# Altium footprint library ELO301_G1.PcbLib: 17 footprints (part 1 of 2)
Each footprint in its own frame and in the unit in brackets; x right, y up, seen from the top. Pads: shape width x height; smd on the part's side, far side on the other; paste and mask are expansions set on the pad; w line width, h text height; cw(c..) or ccw(c..) is an arc to the next point about the centre after c.
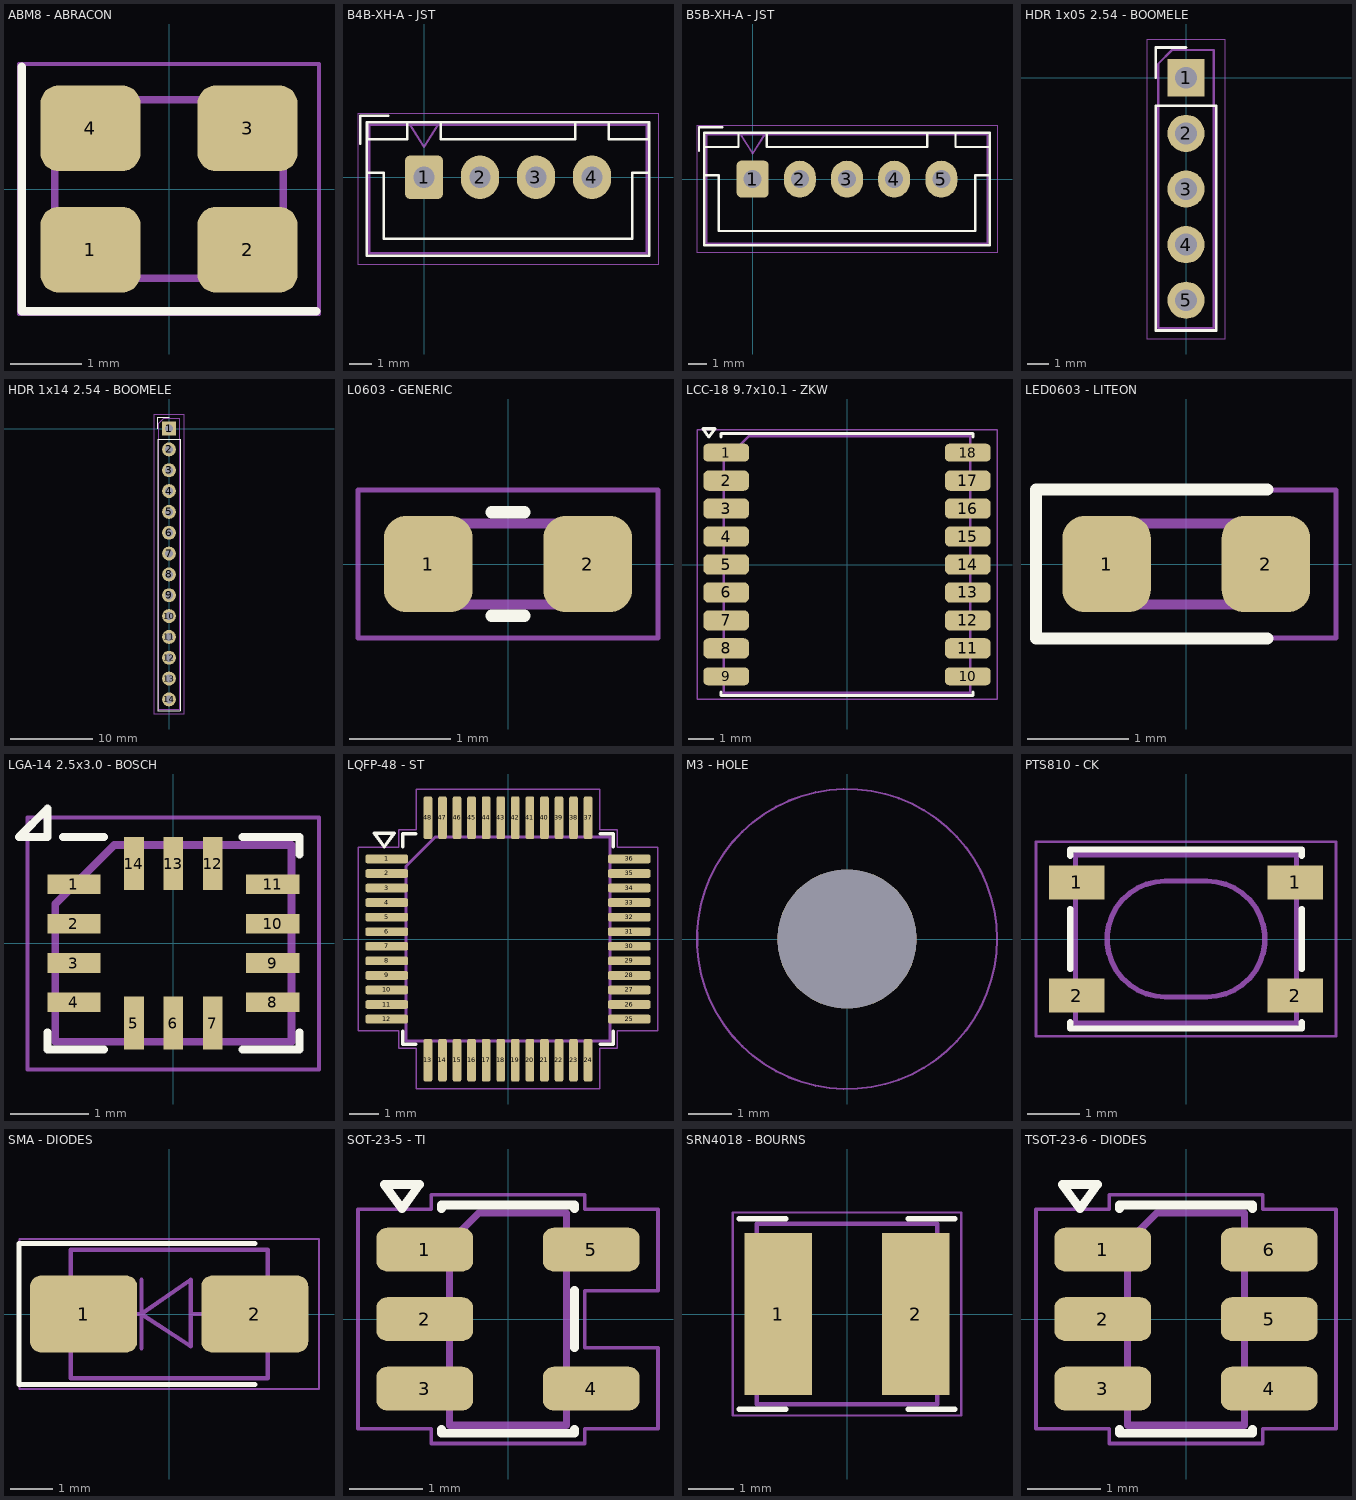
[diagram p0: the footprints below, top view; thin cyan lines are the x and y axes]

## ABM8 - ABRACON [mm] "Abracon ABM8G, Miniature Ceramic Crystal, 3.2x2.5mm package, SMD, http://www.abracon.com/Resonators/ABM8G.pdf"
pads (4):
  rrect42% 1.4x1.2 smd: 1(-1.1,-0.85) 2(1.1,-0.85) 3(1.1,0.85) 4(-1.1,0.85)
Top Overlay:
  lines w0.12: -2.06,1.71 -2.06,-1.71 2.06,-1.71
Mechanical 13:
  lines w0.1: -1.6,-0.625 -0.975,-1.25 1.6,-1.25 1.6,1.25 -1.6,1.25 -1.6,-0.625
Mechanical 15:
  lines w0.05: -2.1,-1.75 2.1,-1.75 2.1,1.75 -2.1,1.75 -2.1,-1.75
Mechanical 29:
  text ".Designator" at -0.508,-0.102 h0.25

## B4B-XH-A - JST [mm] "JST XH series connector, B4B-XH-A (http://www.jst-mfg.com/product/pdf/eng/eXH.pdf)"
pads (4):
  rrect29% 1.7x1.95 hole 0.95: 1(0,0)
  oval 1.7x1.95 hole 0.95: 2(2.5,0) 3(5,0) 4(7.5,0)
Top Overlay:
  lines w0.12: -2.85,1.5 -2.85,2.75 -1.6,2.75 ; -2.55,0.2 -1.8,0.2 -1.8,-2.75 3.75,-2.75 9.3,-2.75 9.3,0.2 10.05,0.2 ; -2.56,-3.51 10.06,-3.51 10.06,2.46 -2.56,2.46 -2.56,-3.51 ; -2.55,1.7 -0.75,1.7 -0.75,2.45 -2.55,2.45 -2.55,1.7 ; 0.75,1.7 6.75,1.7 6.75,2.45 0.75,2.45 0.75,1.7 ; 8.25,1.7 10.05,1.7 10.05,2.45 8.25,2.45 8.25,1.7
Mechanical 13:
  lines w0.1: -0.625,2.35 0,1.35 0.625,2.35 ; -2.45,-3.4 9.95,-3.4 9.95,2.35 -2.45,2.35 -2.45,-3.4
Mechanical 15:
  lines w0.05: -2.95,-3.9 10.45,-3.9 10.45,2.85 -2.95,2.85 -2.95,-3.9
Mechanical 29:
  text ".Designator" at -0.508,-0.102 h0.25

## B5B-XH-A - JST [mm] "JST XH series connector, B5B-XH-A (http://www.jst-mfg.com/product/pdf/eng/eXH.pdf)"
pads (5):
  rrect29% 1.7x1.95 hole 0.95: 1(0,0)
  oval 1.7x1.95 hole 0.95: 2(2.5,0) 3(5,0) 4(7.5,0) 5(10,0)
Top Overlay:
  lines w0.12: -2.85,1.5 -2.85,2.75 -1.6,2.75 ; -2.55,0.2 -1.8,0.2 -1.8,-2.75 5,-2.75 11.8,-2.75 11.8,0.2 12.55,0.2 ; -2.56,-3.51 12.56,-3.51 12.56,2.46 -2.56,2.46 -2.56,-3.51 ; -2.55,1.7 -0.75,1.7 -0.75,2.45 -2.55,2.45 -2.55,1.7 ; 0.75,1.7 9.25,1.7 9.25,2.45 0.75,2.45 0.75,1.7 ; 10.75,1.7 12.55,1.7 12.55,2.45 10.75,2.45 10.75,1.7
Mechanical 13:
  lines w0.1: -0.625,2.35 0,1.35 0.625,2.35 ; -2.45,-3.4 12.45,-3.4 12.45,2.35 -2.45,2.35 -2.45,-3.4
Mechanical 15:
  lines w0.05: -2.95,-3.9 12.95,-3.9 12.95,2.85 -2.95,2.85 -2.95,-3.9
Mechanical 29:
  text ".Designator" at -0.508,-0.102 h0.25

## HDR 1x05 2.54 - BOOMELE [mm] "Through hole straight pin header, 1x05, 2.54mm pitch, single row"
pads (5):
  rect 1.7x1.7 hole 1: 1(0,0)
  round 1.7 hole 1: 2(0,-2.54) 3(0,-5.08) 4(0,-7.62) 5(0,-10.16)
Top Overlay:
  lines w0.12: -1.38,0 -1.38,1.38 0,1.38 ; -1.38,-11.54 -1.38,-1.27 1.38,-1.27 1.38,-11.54 -1.38,-11.54
Mechanical 13:
  lines w0.1: -1.27,-11.43 -1.27,0.635 -0.635,1.27 1.27,1.27 1.27,-11.43 -1.27,-11.43
Mechanical 15:
  lines w0.05: -1.77,-11.93 1.77,-11.93 1.77,1.77 -1.77,1.77 -1.77,-11.93
Mechanical 29:
  text ".Designator" at -0.508,-0.102 h0.25

## HDR 1x14 2.54 - BOOMELE [mm] "Through hole straight pin header, 1x14, 2.54mm pitch, single row"
pads (14):
  rect 1.7x1.7 hole 1: 1(0,0)
  round 1.7 hole 1: 2(0,-2.54) 3(0,-5.08) 4(0,-7.62) 5(0,-10.16) 6(0,-12.7) 7(0,-15.24) 8(0,-17.78) 9(0,-20.32) 10(0,-22.86) 11(0,-25.4) 12(0,-27.94) 13(0,-30.48) 14(0,-33.02)
Top Overlay:
  lines w0.12: -1.38,0 -1.38,1.38 0,1.38 ; -1.38,-34.4 -1.38,-1.27 1.38,-1.27 1.38,-34.4 -1.38,-34.4
Mechanical 13:
  lines w0.1: -1.27,-34.29 -1.27,0.635 -0.635,1.27 1.27,1.27 1.27,-34.29 -1.27,-34.29
Mechanical 15:
  lines w0.05: -1.77,-34.8 1.77,-34.8 1.77,1.78 -1.77,1.78 -1.77,-34.8
Mechanical 29:
  text ".Designator" at -0.508,-0.102 h0.25

## L0603 - GENERIC [mm] "Inductor SMD 0603 (1608 Metric), square (rectangular) end terminal, IPC-7351 nominal, (Body size source: http://www.tortai-tech.com/upload/download/2011102023233369053.pdf)"
pads (2):
  rrect50% 0.875x0.95 smd: 1(-0.788,0) 2(0.788,0)
Top Overlay:
  lines w0.12: -0.163,-0.51 0.163,-0.51 ; -0.163,0.51 0.163,0.51
Mechanical 13:
  lines w0.1: -0.8,-0.4 0.8,-0.4 0.8,0.4 -0.8,0.4 -0.8,-0.4
Mechanical 15:
  lines w0.05: -1.48,-0.73 1.48,-0.73 1.48,0.73 -1.48,0.73 -1.48,-0.73
Mechanical 29:
  text ".Designator" at -0.508,-0.102 h0.25

## LCC-18 9.7x10.1 - ZKW [mm] "ublox MAX 6/7/8, (https://www.u-blox.com/sites/default/files/MAX-8-M8-FW3_HardwareIntegrationManual_%28UBX-15030059%29.pdf)"
pads (18):
  rrect50% 1.8x0.7 smd: 1(-4.75,4.4) 9(-4.75,-4.4) 10(4.75,-4.4) 18(4.75,4.4)
  rrect50% 1.8x0.8 smd: 2(-4.75,3.3) 3(-4.75,2.2) 4(-4.75,1.1) 5(-4.75,0) 6(-4.75,-1.1) 7(-4.75,-2.2) 8(-4.75,-3.3) 11(4.75,-3.3) 12(4.75,-2.2) 13(4.75,-1.1) 14(4.75,0) 15(4.75,1.1) 16(4.75,2.2) 17(4.75,3.3)
Top Overlay:
  lines w0.12: -4.96,-5.01 -4.96,-5.16 4.96,-5.16 4.96,-5.01 ; -4.96,5.01 -4.96,5.16 4.96,5.16 4.96,5.01 ; -5.43,5.01 -5.67,5.34 -5.19,5.34 -5.43,5.01 ; -5.43,5.01 -5.43,5.01
Mechanical 13:
  lines w0.1: -4.85,-5.05 -4.85,4.05 -3.85,5.05 4.85,5.05 4.85,-5.05 -4.85,-5.05
Mechanical 15:
  lines w0.05: -5.9,-5.3 -5.9,5.3 5.9,5.3 5.9,-5.3 -5.9,-5.3
Mechanical 29:
  text ".Designator" at -0.508,-0.102 h0.25

## LED0603 - LITEON [mm] "LED SMD 0603 (1608 Metric), square (rectangular) end terminal, IPC-7351 nominal, (Body size source: http://www.tortai-tech.com/upload/download/2011102023233369053.pdf)"
pads (2):
  rrect50% 0.875x0.95 smd: 1(-0.788,0) 2(0.788,0)
Top Overlay:
  lines w0.12: 0.8,-0.735 -1.485,-0.735 -1.485,0.735 0.8,0.735
Mechanical 13:
  lines w0.1: -0.8,-0.4 -0.8,0.1 -0.5,0.4 0.8,0.4 0.8,-0.4 -0.8,-0.4
Mechanical 15:
  lines w0.05: -1.48,-0.73 1.48,-0.73 1.48,0.73 -1.48,0.73 -1.48,-0.73
Mechanical 29:
  text ".Designator" at -0.508,-0.102 h0.25

## LGA-14 2.5x3.0 - BOSCH [mm] "LGA-14 Bosch https://ae-bst.resource.bosch.com/media/_tech/media/datasheets/BST-BMI160-DS000-07.pdf"
pads (14):
  rect 0.675x0.25 smd: 1(-1.263,0.75) 2(-1.263,0.25) 3(-1.263,-0.25) 4(-1.263,-0.75) 8(1.263,-0.75) 9(1.263,-0.25) 10(1.263,0.25) 11(1.263,0.75)
  rect 0.25x0.675 smd: 5(-0.5,-1.012) 6(0,-1.012) 7(0.5,-1.012) 12(0.5,1.012) 13(0,1.012) 14(-0.5,1.012)
Top Overlay:
  lines w0.1: -1.6,-1.13 -1.6,-1.35 -0.88,-1.35 ; -1.4,1.35 -0.88,1.35 ; 0.88,-1.35 1.6,-1.35 1.6,-1.13 ; 0.88,1.35 1.6,1.35 1.6,1.13 ; -1.6,1.35 -1.96,1.35 -1.6,1.71 -1.6,1.35 ; -1.6,1.35 -1.6,1.35
Mechanical 13:
  lines w0.1: -1.5,-1.25 -1.5,0.5 -0.75,1.25 1.5,1.25 1.5,-1.25 -1.5,-1.25
Mechanical 15:
  lines w0.05: -1.85,-1.6 -1.85,1.6 1.85,1.6 1.85,-1.6 -1.85,-1.6
Mechanical 29:
  text ".Designator" at -0.508,-0.102 h0.25

## LQFP-48 - ST [mm] "LQFP, 48 Pin (JEDEC MS-026 variation BBC, 1.40mm body thickness, https://www.jedec.org/document_search?search_api_views_fulltext=MS-026, https://www.analog.com/media/en/package-pcb-resources/package/pkg_pdf/ltc-legacy-lqfp/05081760_a_lx48.pdf)"
pads (48):
  rrect50% 1.475x0.3 smd: 1(-4.163,2.75) 2(-4.163,2.25) 3(-4.163,1.75) 4(-4.163,1.25) 5(-4.163,0.75) 6(-4.163,0.25) 7(-4.163,-0.25) 8(-4.163,-0.75) 9(-4.163,-1.25) 10(-4.163,-1.75) 11(-4.163,-2.25) 12(-4.163,-2.75) 25(4.163,-2.75) 26(4.163,-2.25) 27(4.163,-1.75) 28(4.163,-1.25) 29(4.163,-0.75) 30(4.163,-0.25) 31(4.163,0.25) 32(4.163,0.75) 33(4.163,1.25) 34(4.163,1.75) 35(4.163,2.25) 36(4.163,2.75)
  rrect50% 0.3x1.475 smd: 13(-2.75,-4.163) 14(-2.25,-4.163) 15(-1.75,-4.163) 16(-1.25,-4.163) 17(-0.75,-4.163) 18(-0.25,-4.163) 19(0.25,-4.163) 20(0.75,-4.163) 21(1.25,-4.163) 22(1.75,-4.163) 23(2.25,-4.163) 24(2.75,-4.163) 37(2.75,4.163) 38(2.25,4.163) 39(1.75,4.163) 40(1.25,4.163) 41(0.75,4.163) 42(0.25,4.163) 43(-0.25,4.163) 44(-0.75,4.163) 45(-1.25,4.163) 46(-1.75,4.163) 47(-2.25,4.163) 48(-2.75,4.163)
Top Overlay:
  lines w0.12: -3.61,-3.16 -3.61,-3.61 -3.16,-3.61 ; -3.61,3.16 -3.61,3.61 -3.16,3.61 ; 3.16,-3.61 3.61,-3.61 3.61,-3.16 ; 3.16,3.61 3.61,3.61 3.61,3.16 ; -4.59,3.63 -4.25,3.16 -3.91,3.63 -4.59,3.63
Mechanical 13:
  lines w0.1: -3.5,-3.5 3.5,-3.5 3.5,3.5 -2.5,3.5 -3.5,2.5 -3.5,-3.5
Mechanical 15:
  lines w0.05: -5.15,-3.15 -5.15,3.15 -3.75,3.15 -3.75,3.75 -3.15,3.75 -3.15,5.15 3.15,5.15 3.15,3.75 3.75,3.75 3.75,3.15 5.15,3.15 5.15,-3.15 3.75,-3.15 3.75,-3.75 3.15,-3.75 3.15,-5.15 -3.15,-5.15 -3.15,-3.75 -3.75,-3.75 -3.75,-3.15 -5.15,-3.15
Mechanical 29:
  text ".Designator" at -0.508,-0.102 h0.25

## M3 - HOLE [mm] "Mounting Hole 3.2mm, M3, no annular, generated by kicad-footprint-generator mountinghole.py"
pads (1):
  round 3.2 hole 3.2 unplated: ""(0,0)
Mechanical 15:
  circle w0.05: c0,0 r3.45
Mechanical 29:
  text ".Designator" at -0.508,-0.102 h0.25

## PTS810 - CK [mm] "C&K Components, PTS 810 Series, Microminiature SMT Top Actuated, http://www.ckswitches.com/media/1476/pts810.pdf"
pads (4):
  rect 1.05x0.65 smd: 1(-2.075,1.075) 1(2.075,1.075) 2(-2.075,-1.075) 2(2.075,-1.075)
Top Overlay:
  lines w0.12: -2.2,-1.58 -2.2,-1.7 2.2,-1.7 2.2,-1.58 ; -2.2,-0.57 -2.2,0.57 ; -2.2,1.58 -2.2,1.7 2.2,1.7 2.2,1.58 ; 2.2,-0.57 2.2,0.57
Mechanical 13:
  lines w0.1: -2.1,-1.6 -2.1,1.6 2.1,1.6 2.1,-1.6 -2.1,-1.6 ; -0.4,-1.1 0.4,-1.1 ccw(c0.4,0) 0.4,1.1 -0.4,1.1 ccw(c-0.4,0) -0.4,-1.1
Mechanical 15:
  lines w0.05: -2.85,-1.85 -2.85,1.85 2.85,1.85 2.85,-1.85 -2.85,-1.85
Mechanical 29:
  text ".Designator" at -0.508,-0.102 h0.25

## SMA - DIODES [mm] "Diode SMA (DO-214AC)"
pads (2):
  rrect28% 2.5x1.8 smd: 1(-2,0) 2(2,0)
Top Overlay:
  lines w0.12: 2,-1.65 -3.51,-1.65 -3.51,1.65 2,1.65
Mechanical 13:
  lines w0.1: -1.551,-0.001 -0.649,-0.001 ; -0.649,-0.801 -0.649,0.799 ; 0.501,-0.001 1.499,-0.001 ; -0.649,-0.001 0.501,0.799 0.501,-0.75 -0.649,-0.001 ; -2.3,-1.5 -2.3,1.5 2.3,1.5 2.3,-1.5 -2.3,-1.5
Mechanical 15:
  lines w0.05: -3.5,-1.75 -3.5,1.75 3.5,1.75 3.5,-1.75 -3.5,-1.75
Mechanical 29:
  text ".Designator" at -0.508,-0.102 h0.25

## SOT-23-5 - TI [mm] "SOT, 5 Pin (JEDEC MO-178 Var AA https://www.jedec.org/document_search?search_api_views_fulltext=MO-178)"
pads (5):
  rrect50% 1.325x0.6 smd: 1(-1.137,0.95) 2(-1.137,0) 3(-1.137,-0.95) 4(1.137,-0.95) 5(1.137,0.95)
Top Overlay:
  lines w0.12: -0.91,-1.51 -0.91,-1.56 0.91,-1.56 0.91,-1.51 ; -0.91,1.51 -0.91,1.56 0.91,1.56 0.91,1.51 ; 0.91,-0.39 0.91,0.39 ; -1.69,1.84 -1.45,1.51 -1.21,1.84 -1.69,1.84
Mechanical 13:
  lines w0.1: -0.8,-1.45 0.8,-1.45 0.8,1.45 -0.4,1.45 -0.8,1.05 -0.8,-1.45
Mechanical 15:
  lines w0.05: -2.05,-1.5 -2.05,1.5 -1.05,1.5 -1.05,1.7 1.05,1.7 1.05,1.5 2.05,1.5 2.05,0.39 1.05,0.39 1.05,-0.39 2.05,-0.39 2.05,-1.5 1.05,-1.5 1.05,-1.7 -1.05,-1.7 -1.05,-1.5 -2.05,-1.5
Mechanical 29:
  text ".Designator" at -0.508,-0.102 h0.25

## SRN4018 - BOURNS [mm] "Bourns SRN4018 series SMD inductor, https://www.bourns.com/docs/Product-Datasheets/SRN4018.pdf"
pads (2):
  rect 1.5x3.6 smd: 1(-1.525,0) 2(1.525,0)
Top Overlay:
  lines w0.12: -2.385,-2.11 -1.36,-2.11 ; -2.385,2.11 -1.36,2.11 ; 1.36,-2.11 2.385,-2.11 ; 1.36,2.11 2.385,2.11
Mechanical 13:
  lines w0.1: -2,-2 -2,2 2,2 2,-2 -2,-2
Mechanical 15:
  lines w0.05: -2.53,-2.25 -2.53,2.25 2.53,2.25 2.53,-2.25 -2.53,-2.25
Mechanical 29:
  text ".Designator" at -0.508,-0.102 h0.25

## TSOT-23-6 - DIODES [mm] "TSOT, 6 Pin (https://www.jedec.org/sites/default/files/docs/MO-193D.pdf variant AA)"
pads (6):
  rrect50% 1.325x0.6 smd: 1(-1.137,0.95) 2(-1.137,0) 3(-1.137,-0.95) 4(1.137,-0.95) 5(1.137,0) 6(1.137,0.95)
Top Overlay:
  lines w0.12: -0.91,-1.51 -0.91,-1.56 0.91,-1.56 0.91,-1.51 ; -0.91,1.51 -0.91,1.56 0.91,1.56 0.91,1.51 ; -1.69,1.84 -1.45,1.51 -1.21,1.84 -1.69,1.84
Mechanical 13:
  lines w0.1: -0.8,-1.45 0.8,-1.45 0.8,1.45 -0.4,1.45 -0.8,1.05 -0.8,-1.45
Mechanical 15:
  lines w0.05: -2.05,-1.5 -2.05,1.5 -1.05,1.5 -1.05,1.7 1.05,1.7 1.05,1.5 2.05,1.5 2.05,-1.5 1.05,-1.5 1.05,-1.7 -1.05,-1.7 -1.05,-1.5 -2.05,-1.5
Mechanical 29:
  text ".Designator" at -0.508,-0.102 h0.25